# Altium schematic symbol library Sheet1.SchLib: 4 symbols
Pins are listed as number, name and electrical type; pins without a type are passive.

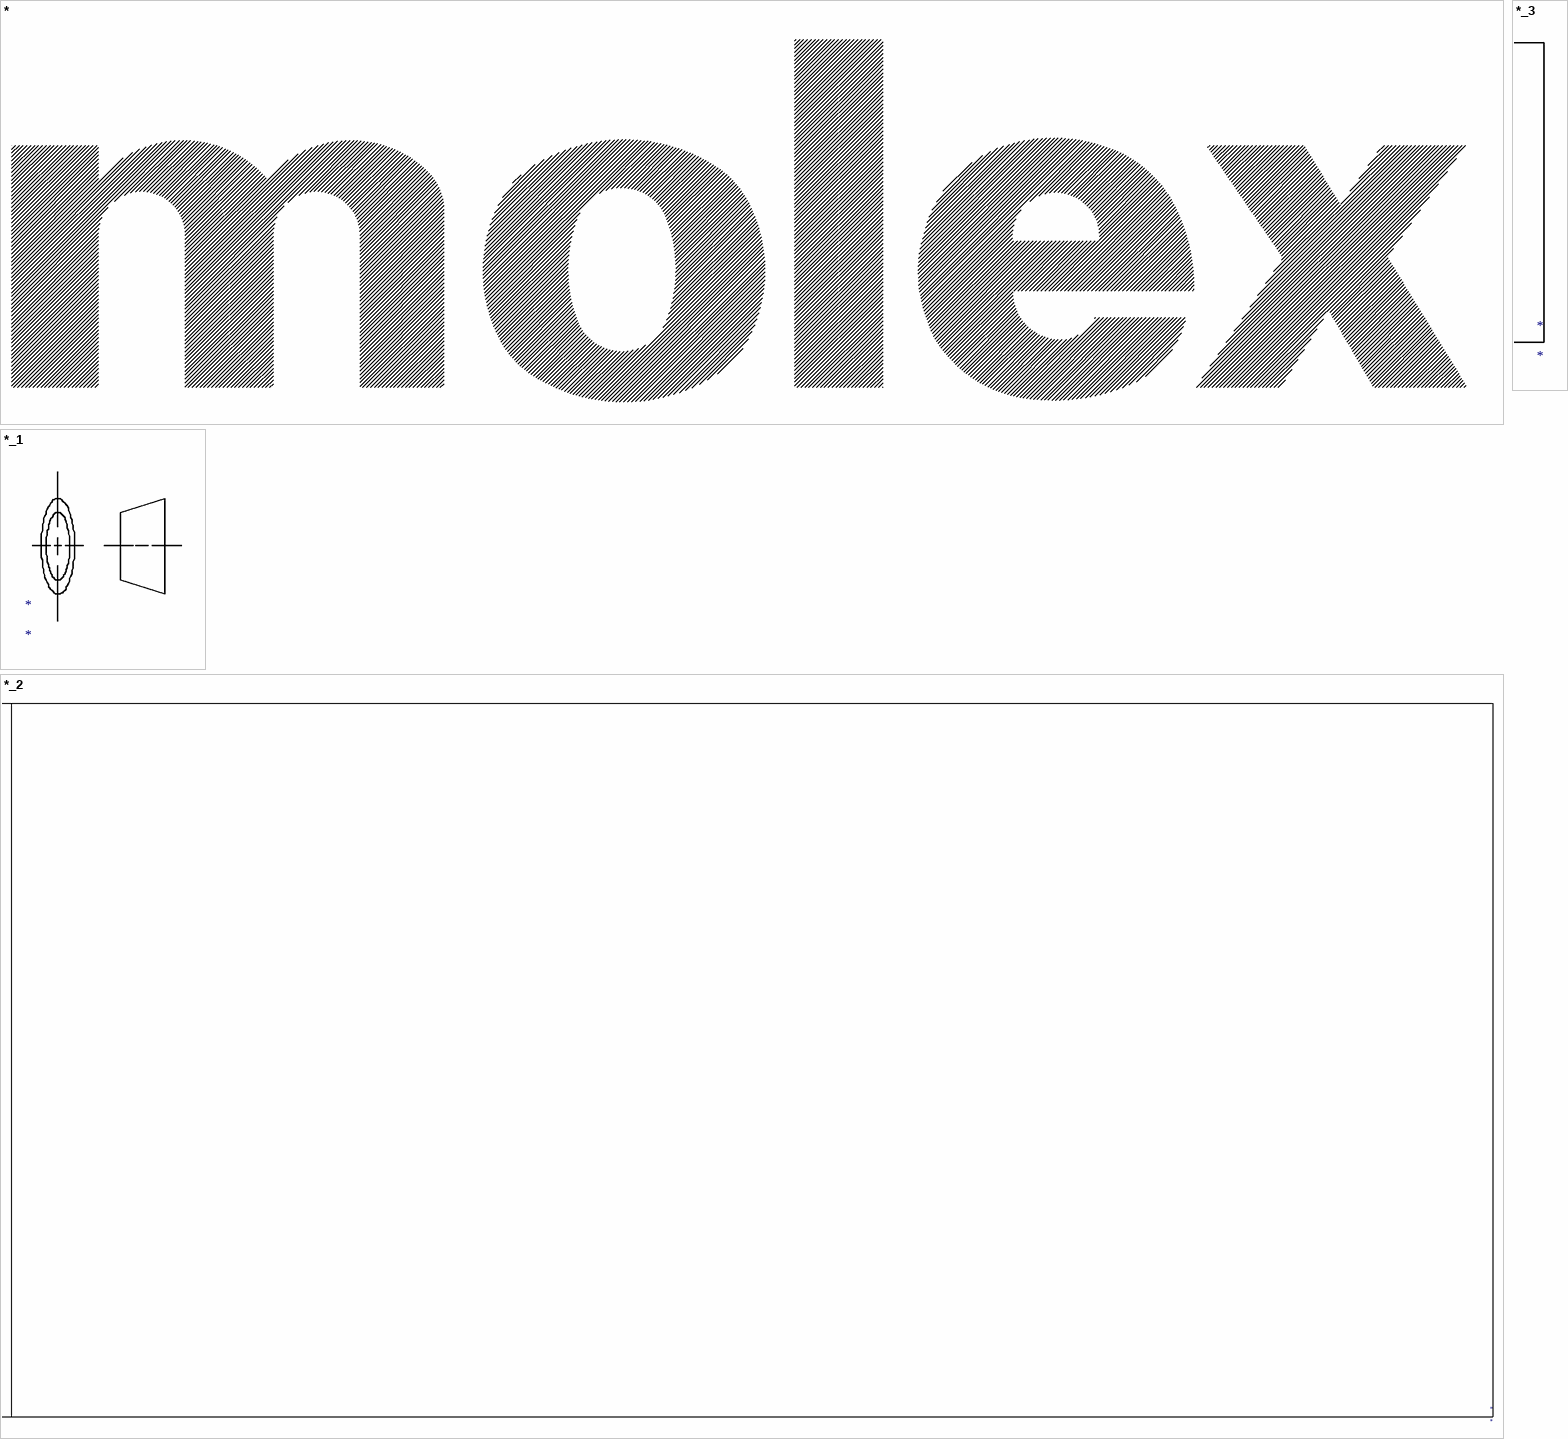
[diagram p0: symbols * to *_3]

## *
designator *

## *_1
designator *

## *_2
designator *

## *_3
designator *